# Altium footprint library PcbLib1.PcbLib: 41 footprints (part 1 of 3)
Each footprint in its own frame and in the unit in brackets; x right, y up, seen from the top. Pads: shape width x height; smd on the part's side, far side on the other; paste and mask are expansions set on the pad; w line width, h text height; cw(c..) or ccw(c..) is an arc to the next point about the centre after c.
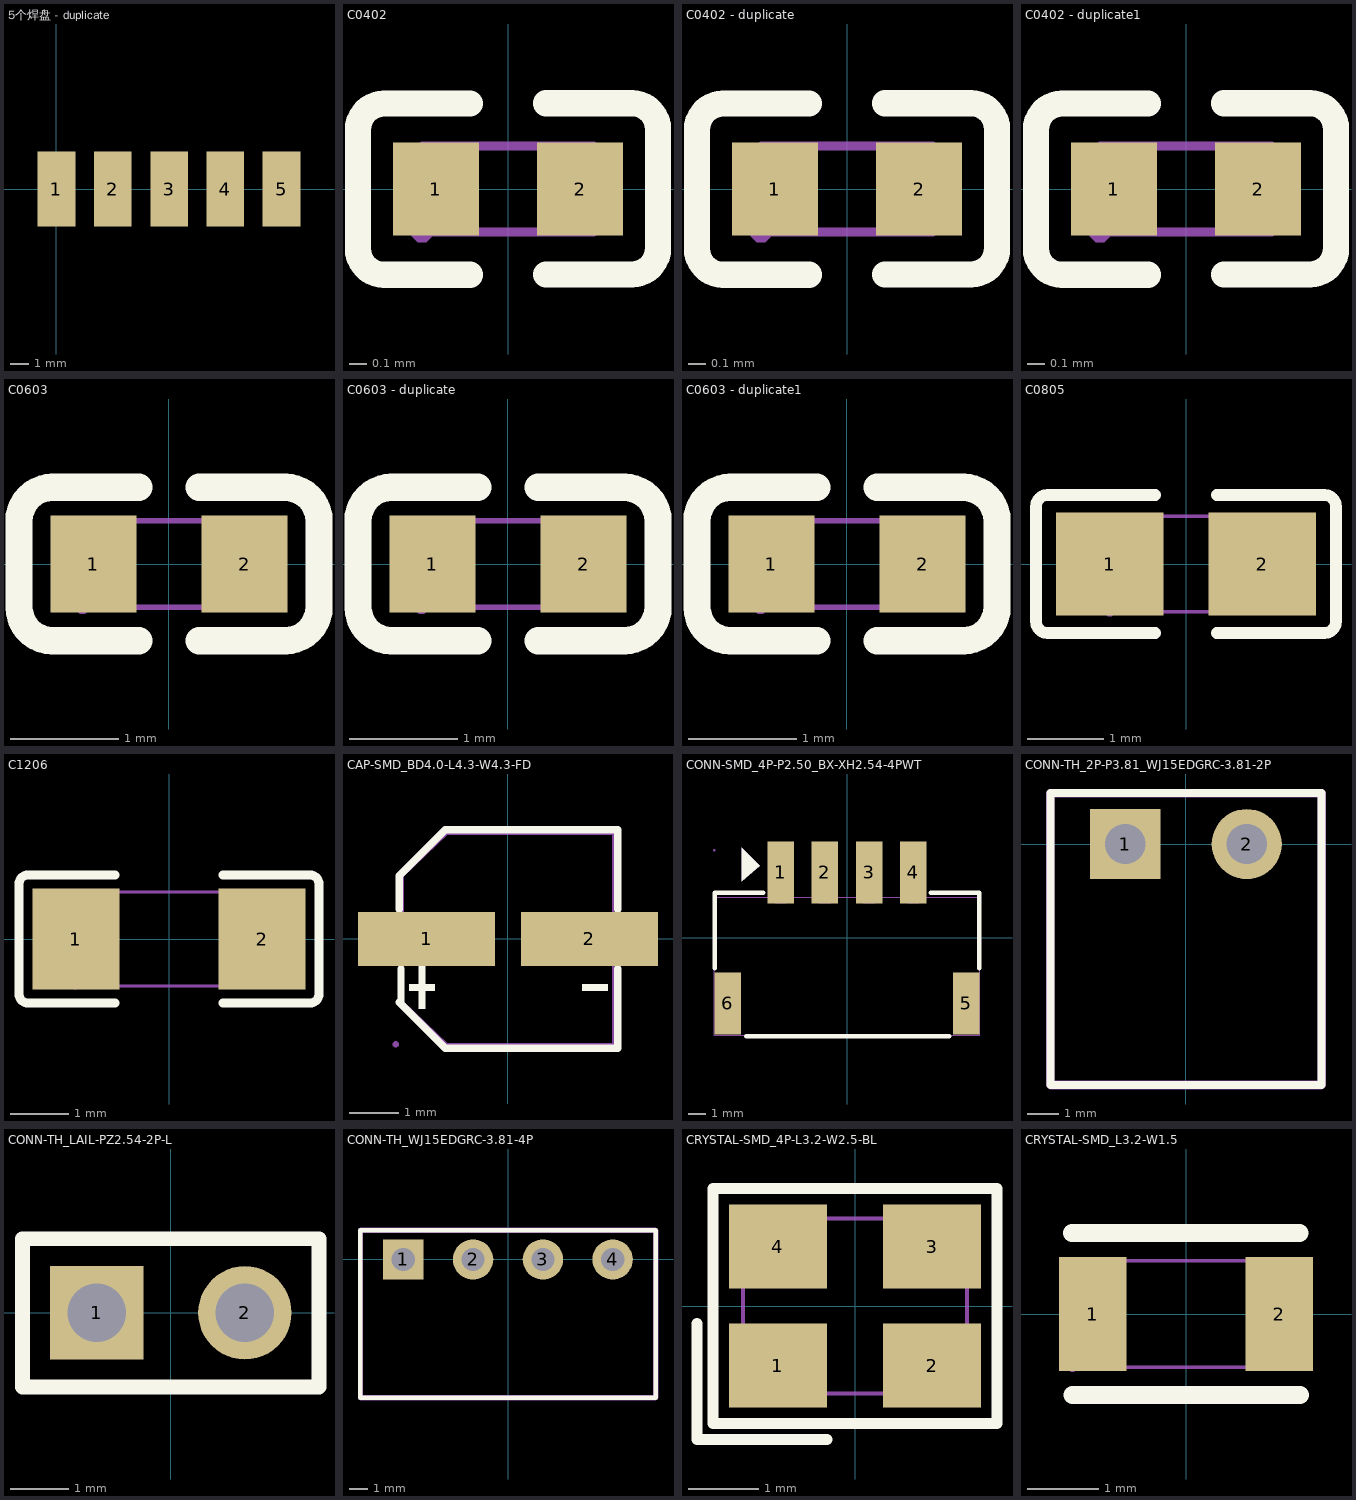
[diagram p0: the footprints below, top view; thin cyan lines are the x and y axes]

## 5个焊盘 - duplicate [mm]
pads (5):
  rect 2x4 smd: 1(0,0) 2(3,0) 3(6.001,0) 4(9,0) 5(12,0)

## C0402 [mm]
pads (2):
  rect 0.5x0.54 smd: 1(-0.42,0) 2(0.42,0)
Top Overlay:
  lines w0.152: -0.221,-0.5 -0.721,-0.5 cw(c-0.721,-0.347) -0.874,-0.347 -0.874,0.345 cw(c-0.721,0.345) -0.721,0.498 -0.221,0.498 ; 0.221,-0.498 0.721,-0.498 ccw(c0.721,-0.345) 0.874,-0.345 0.874,0.347 ccw(c0.721,0.347) 0.721,0.5 0.221,0.5
Mechanical 6:
  lines w0.051: -0.5,-0.25 0.5,-0.25 0.5,0.25 -0.5,0.25 -0.5,-0.25
Mechanical 8:
  region: -0.44,-0.25 -0.44,-0.275 -0.475,-0.31 -0.525,-0.31 -0.56,-0.275 -0.56,-0.25 -0.56,-0.225 -0.525,-0.19 -0.475,-0.19 -0.44,-0.225 -0.44,-0.25
Mechanical 9:
  region: 0.5,-0.25 0.5,0.25 0.25,0.25 0.25,-0.25
  region: -0.5,-0.25 -0.5,0.25 -0.25,0.25 -0.25,-0.25

## C0402 - duplicate [mm]
pads (2):
  rect 0.5x0.54 smd: 1(-0.42,0) 2(0.42,0)
Top Overlay:
  lines w0.152: -0.221,-0.5 -0.721,-0.5 cw(c-0.721,-0.347) -0.874,-0.347 -0.874,0.345 cw(c-0.721,0.345) -0.721,0.498 -0.221,0.498 ; 0.221,-0.498 0.721,-0.498 ccw(c0.721,-0.345) 0.874,-0.345 0.874,0.347 ccw(c0.721,0.347) 0.721,0.5 0.221,0.5
Mechanical 6:
  lines w0.051: -0.5,-0.25 0.5,-0.25 0.5,0.25 -0.5,0.25 -0.5,-0.25
Mechanical 8:
  region: -0.44,-0.25 -0.44,-0.275 -0.475,-0.31 -0.525,-0.31 -0.56,-0.275 -0.56,-0.25 -0.56,-0.225 -0.525,-0.19 -0.475,-0.19 -0.44,-0.225 -0.44,-0.25
Mechanical 9:
  region: 0.5,-0.25 0.5,0.25 0.25,0.25 0.25,-0.25
  region: -0.5,-0.25 -0.5,0.25 -0.25,0.25 -0.25,-0.25

## C0402 - duplicate1 [mm]
pads (2):
  rect 0.5x0.54 smd: 1(-0.42,0) 2(0.42,0)
Top Overlay:
  lines w0.152: -0.221,-0.5 -0.721,-0.5 cw(c-0.721,-0.347) -0.874,-0.347 -0.874,0.345 cw(c-0.721,0.345) -0.721,0.498 -0.221,0.498 ; 0.221,-0.498 0.721,-0.498 ccw(c0.721,-0.345) 0.874,-0.345 0.874,0.347 ccw(c0.721,0.347) 0.721,0.5 0.221,0.5
Mechanical 6:
  lines w0.051: -0.5,-0.25 0.5,-0.25 0.5,0.25 -0.5,0.25 -0.5,-0.25
Mechanical 8:
  region: -0.44,-0.25 -0.44,-0.275 -0.475,-0.31 -0.525,-0.31 -0.56,-0.275 -0.56,-0.25 -0.56,-0.225 -0.525,-0.19 -0.475,-0.19 -0.44,-0.225 -0.44,-0.25
Mechanical 9:
  region: 0.5,-0.25 0.5,0.25 0.25,0.25 0.25,-0.25
  region: -0.5,-0.25 -0.5,0.25 -0.25,0.25 -0.25,-0.25

## C0603 [mm]
pads (2):
  rect 0.8x0.9 smd: 1(-0.7,0) 2(0.7,0)
Top Overlay:
  lines w0.254: -1.08,-0.71 -0.28,-0.71 ; -1.08,0.71 -0.28,0.71 ; -1.08,-0.71 cw(c-1.08,-0.4) -1.39,-0.4 -1.39,0.4 cw(c-1.08,0.4) -1.08,0.71 ; 0.28,-0.71 1.08,-0.71 ccw(c1.08,-0.4) 1.39,-0.4 1.39,0.4 ccw(c1.08,0.4) 1.08,0.71 0.28,0.71
Mechanical 6:
  lines w0.051: -0.8,-0.4 -0.8,0.4 0.8,0.4 0.8,-0.4 -0.8,-0.4
Mechanical 8:
  region: -0.74,-0.4 -0.74,-0.425 -0.775,-0.46 -0.825,-0.46 -0.86,-0.425 -0.86,-0.4 -0.86,-0.375 -0.825,-0.34 -0.775,-0.34 -0.74,-0.375 -0.74,-0.4
Mechanical 9:
  region: -0.8,-0.4 -0.8,0.4 -0.5,0.4 -0.5,-0.4
  region: 0.8,-0.4 0.8,0.4 0.5,0.4 0.5,-0.4

## C0603 - duplicate [mm]
pads (2):
  rect 0.8x0.9 smd: 1(-0.7,0) 2(0.7,0)
Top Overlay:
  lines w0.254: -1.08,-0.71 -0.28,-0.71 ; -1.08,0.71 -0.28,0.71 ; -1.08,-0.71 cw(c-1.08,-0.4) -1.39,-0.4 -1.39,0.4 cw(c-1.08,0.4) -1.08,0.71 ; 0.28,-0.71 1.08,-0.71 ccw(c1.08,-0.4) 1.39,-0.4 1.39,0.4 ccw(c1.08,0.4) 1.08,0.71 0.28,0.71
Mechanical 6:
  lines w0.051: -0.8,-0.4 0.8,-0.4 0.8,0.4 -0.8,0.4 -0.8,-0.4
Mechanical 8:
  region: -0.74,-0.4 -0.74,-0.425 -0.775,-0.46 -0.825,-0.46 -0.86,-0.425 -0.86,-0.4 -0.86,-0.375 -0.825,-0.34 -0.775,-0.34 -0.74,-0.375 -0.74,-0.4
Mechanical 9:
  region: 0.8,-0.4 0.8,0.4 0.5,0.4 0.5,-0.4
  region: -0.8,-0.4 -0.8,0.4 -0.5,0.4 -0.5,-0.4

## C0603 - duplicate1 [mm]
pads (2):
  rect 0.8x0.9 smd: 1(-0.7,0) 2(0.7,0)
Top Overlay:
  lines w0.254: -1.08,-0.71 -0.28,-0.71 ; -1.08,0.71 -0.28,0.71 ; -1.08,-0.71 cw(c-1.08,-0.4) -1.39,-0.4 -1.39,0.4 cw(c-1.08,0.4) -1.08,0.71 ; 0.28,-0.71 1.08,-0.71 ccw(c1.08,-0.4) 1.39,-0.4 1.39,0.4 ccw(c1.08,0.4) 1.08,0.71 0.28,0.71
Mechanical 6:
  lines w0.051: -0.8,-0.4 -0.8,0.4 0.8,0.4 0.8,-0.4 -0.8,-0.4
Mechanical 8:
  region: -0.74,-0.4 -0.74,-0.425 -0.775,-0.46 -0.825,-0.46 -0.86,-0.425 -0.86,-0.4 -0.86,-0.375 -0.825,-0.34 -0.775,-0.34 -0.74,-0.375 -0.74,-0.4
Mechanical 9:
  region: -0.8,-0.4 -0.8,0.4 -0.5,0.4 -0.5,-0.4
  region: 0.8,-0.4 0.8,0.4 0.5,0.4 0.5,-0.4

## C0805 [mm]
pads (2):
  rect 1.41x1.35 smd paste-100 mask+0.051: 1(-1,0) 2(1,0)
Top Overlay:
  lines w0.152: -0.401,-0.904 -1.811,-0.904 cw(c-1.811,-0.751) -1.964,-0.751 -1.964,0.751 cw(c-1.811,0.751) -1.811,0.904 -0.401,0.904 ; 0.401,-0.904 1.811,-0.904 ccw(c1.811,-0.751) 1.964,-0.751 1.964,0.751 ccw(c1.811,0.751) 1.811,0.904 0.401,0.904
Top Paste:
  region: -1.705,-0.64 -1.705,0.64 -1.655,0.69 -0.505,0.69 -0.455,0.64 -0.45,0.23 -0.9,0.23 -0.9,-0.22 -0.46,-0.22 -0.455,-0.64 -0.505,-0.69 -1.655,-0.69
  region: 1.705,0.64 1.705,-0.64 1.655,-0.69 0.505,-0.69 0.455,-0.64 0.45,-0.23 0.9,-0.23 0.9,0.22 0.46,0.22 0.455,0.64 0.505,0.69 1.655,0.69
Mechanical 6:
  lines w0.051: -1,-0.625 -1,0.625 1,0.625 1,-0.625 -1,-0.625
Mechanical 8:
  region: -0.94,-0.625 -0.94,-0.65 -0.975,-0.685 -1.025,-0.685 -1.06,-0.65 -1.06,-0.625 -1.06,-0.6 -1.025,-0.565 -0.975,-0.565 -0.94,-0.6 -0.94,-0.625
Mechanical 9:
  region: -1,-0.625 -1,0.625 -0.5,0.625 -0.5,-0.625
  region: 1,0.625 1,-0.625 0.5,-0.625 0.5,0.625

## C1206 [mm]
pads (2):
  rect 1.485x1.728 smd paste-100 mask+0.051: 1(-1.593,0) 2(1.593,0)
Top Overlay:
  lines w0.152: -0.926,-1.093 -2.411,-1.093 cw(c-2.411,-0.94) -2.564,-0.94 -2.564,0.94 cw(c-2.411,0.94) -2.411,1.093 -0.926,1.093 ; 0.926,-1.093 2.411,-1.093 ccw(c2.411,-0.94) 2.564,-0.94 2.564,0.94 ccw(c2.411,0.94) 2.411,1.093 0.926,1.093
Top Paste:
  region: -0.85,-0.764 -0.85,-0.394 -0.95,-0.294 -1.255,-0.294 -1.355,-0.194 -1.355,0.194 -1.255,0.294 -0.95,0.294 -0.85,0.394 -0.85,0.764 -0.95,0.864 -2.235,0.864 -2.335,0.764 -2.335,-0.764 -2.235,-0.864 -0.95,-0.864
  region: 0.85,-0.764 0.85,-0.394 0.95,-0.294 1.255,-0.294 1.355,-0.194 1.355,0.194 1.255,0.294 0.95,0.294 0.85,0.394 0.85,0.764 0.95,0.864 2.235,0.864 2.335,0.764 2.335,-0.764 2.235,-0.864 0.95,-0.864
Mechanical 6:
  lines w0.051: -1.6,-0.8 1.6,-0.8 1.6,0.8 -1.6,0.8 -1.6,-0.8
Mechanical 8:
  region: -1.54,-0.8 -1.54,-0.825 -1.575,-0.86 -1.625,-0.86 -1.66,-0.825 -1.66,-0.8 -1.66,-0.775 -1.625,-0.74 -1.575,-0.74 -1.54,-0.775 -1.54,-0.8
Mechanical 9:
  region: 1.6,-0.8 1.6,0.8 1.1,0.8 1.1,-0.8
  region: -1.6,-0.8 -1.6,0.8 -1.1,0.8 -1.1,-0.8

## CAP-SMD_BD4.0-L4.3-W4.3-FD [mm]
pads (2):
  rect 2.8x1.1 smd: 1(-1.661,0) 2(1.661,0)
Top Overlay:
  region: -1.818,-0.559 -1.818,-1.419 -1.689,-1.419 -1.689,-0.559
  region: -2.011,-0.925 -2.011,-1.054 -1.495,-1.054 -1.495,-0.925
  region: 2.031,-0.925 2.031,-1.054 1.515,-1.054 1.515,-0.925
  lines w0.152: -2.217,-1.29 -1.28,-2.226 2.236,-2.226 2.236,-0.607 ; -2.217,0.607 -2.217,1.29 -1.28,2.226 2.236,2.226 2.236,0.607 ; -2.183,-1.29 -2.183,-0.607
Mechanical 2:
  region: -1.818,0.43 -1.818,-0.43 -1.689,-0.43 -1.689,0.43
  region: -2.011,0.064 -2.011,-0.065 -1.495,-0.065 -1.495,0.064
  region: 2.031,0.064 2.031,-0.065 1.515,-0.065 1.515,0.064
Mechanical 6:
  lines w0.051: -2.15,-1.281 -2.15,1.281 -1.248,2.15 2.15,2.15 2.15,-2.15 -1.248,-2.15 -2.15,-1.281
Mechanical 8:
  region: -2.23,-2.15 -2.23,-2.175 -2.266,-2.21 -2.315,-2.21 -2.35,-2.175 -2.35,-2.15 -2.35,-2.125 -2.315,-2.09 -2.266,-2.09 -2.23,-2.125 -2.23,-2.15
Mechanical 9:
  region: -2.29,0.325 -2.29,-0.325 -0.49,-0.325 -0.49,0.325
  region: 2.31,0.325 2.31,-0.325 0.51,-0.325 0.51,0.325

## CONN-SMD_4P-P2.50_BX-XH2.54-4PWT [mm]
pads (6):
  rect 1.5x3.5 smd paste+0 mask+0.05: 1(-3.75,3.7) 2(-1.25,3.7) 3(1.25,3.7) 4(3.75,3.7) 5(6.73,-3.7) 6(-6.73,-3.7)
Top Overlay:
  region: -4.946,4.081 -5.962,5.097 -5.962,3.192
  lines w0.254: -7.486,-1.719 -7.486,2.557 -4.731,2.557 ; -5.708,-5.571 5.783,-5.571 ; 4.73,2.558 6.389,2.558 7.486,2.558 7.486,-1.719
Mechanical 2:
  region: -4.946,4.081 -5.962,5.097 -5.962,3.192
Mechanical 6:
  lines w0.051: -7.5,-5.502 7.5,-5.502 7.5,2.298 -7.5,2.298 -7.5,-5.502
Mechanical 8:
  region: -7.44,4.95 -7.44,4.925 -7.475,4.89 -7.525,4.89 -7.56,4.925 -7.56,4.95 -7.56,4.975 -7.525,5.01 -7.475,5.01 -7.44,4.975 -7.44,4.95
Mechanical 9:
  region: 6.53,-2.45 6.93,-2.45 6.93,-4.95 6.53,-4.95
  region: -6.93,-2.45 -6.53,-2.45 -6.53,-4.95 -6.93,-4.95
  region: 3.43,4.95 4.07,4.95 4.07,1.95 3.43,1.95
  region: 0.93,4.95 1.57,4.95 1.57,1.95 0.93,1.95
  region: -1.57,4.95 -0.93,4.95 -0.93,1.95 -1.57,1.95
  region: -4.07,4.95 -3.43,4.95 -3.43,1.95 -4.07,1.95

## CONN-TH_2P-P3.81_WJ15EDGRC-3.81-2P [mm]
pads (2):
  rect 2.2x2.2 hole 1.26: 1(-1.905,0)
  round 2.2 hole 1.26: 2(1.905,0)
Top Overlay:
  lines w0.254: -4.25,-7.55 -4.25,1.6 4.25,1.6 4.25,-7.55 -4.25,-7.55
Mechanical 2:
  region: -4.123,1.6 -4.123,-7.423 4.123,-7.423 4.123,1.6 4.133,1.649 4.16,1.69 4.201,1.717 4.25,1.727 4.299,1.717 4.34,1.69 4.367,1.649 4.377,1.6 4.377,-7.55 4.367,-7.599 4.34,-7.64 4.299,-7.667 4.25,-7.677 -4.25,-7.677 -4.299,-7.667 -4.34,-7.64 -4.367,-7.599 -4.377,-7.55 -4.377,1.6 -4.367,1.649 -4.34,1.69 -4.299,1.717 -4.25,1.727 -4.201,1.717 -4.16,1.69 -4.133,1.649
  region: 4.25,1.473 -4.25,1.473 -4.299,1.483 -4.34,1.51 -4.367,1.551 -4.377,1.6 -4.367,1.649 -4.34,1.69 -4.299,1.717 -4.25,1.727 4.25,1.727 4.299,1.717 4.34,1.69 4.367,1.649 4.377,1.6 4.367,1.551 4.34,1.51 4.299,1.483
Mechanical 6:
  lines w0.051: -4.25,-7.55 -4.25,1.6 4.25,1.6 4.25,-7.55 -4.25,-7.55
Mechanical 8:
  region: -4.19,-7.55 -4.19,-7.575 -4.225,-7.61 -4.275,-7.61 -4.31,-7.575 -4.31,-7.55 -4.31,-7.525 -4.275,-7.49 -4.225,-7.49 -4.19,-7.525 -4.19,-7.55
Mechanical 9:
  region: 1.505,0.4 2.305,0.4 2.305,-0.4 1.505,-0.4
  region: -2.305,0.4 -1.505,0.4 -1.505,-0.4 -2.305,-0.4

## CONN-TH_LAIL-PZ2.54-2P-L [mm]
pads (2):
  rect 1.6x1.6 hole 1 paste-2539.97 mask+0.05: 1(-1.27,0)
  round 1.6 hole 1 paste-2539.97 mask+0.05: 2(1.27,0)
Top Overlay:
  lines w0.254: -2.54,-1.27 -2.54,1.27 2.54,1.27 2.54,-1.27 -2.54,-1.27
Mechanical 6:
  lines w0.051: -2.54,-1.25 -2.54,1.25 2.54,1.25 2.54,-1.25 -2.54,-1.25
Mechanical 8:
  region: -2.48,-1.25 -2.48,-1.275 -2.515,-1.31 -2.565,-1.31 -2.6,-1.275 -2.6,-1.25 -2.6,-1.225 -2.565,-1.19 -2.515,-1.19 -2.48,-1.225 -2.48,-1.25
Mechanical 9:
  region: -1.59,0.32 -0.95,0.32 -0.95,-0.32 -1.59,-0.32
  region: 0.95,0.32 1.59,0.32 1.59,-0.32 0.95,-0.32

## CONN-TH_WJ15EDGRC-3.81-4P [mm]
pads (4):
  rect 2.2x2.2 hole 1.26: 1(-5.715,0)
  round 2.2 hole 1.26: 2(-1.905,0) 3(1.905,0) 4(5.715,0)
Top Overlay:
  lines w0.254: -8.06,-7.55 -8.06,1.6 8.06,1.6 8.06,-7.55 -8.06,-7.55
Mechanical 2:
  region: -7.933,1.6 -7.933,-7.423 7.933,-7.423 7.933,1.6 7.943,1.649 7.97,1.69 8.011,1.717 8.06,1.727 8.109,1.717 8.15,1.69 8.177,1.649 8.187,1.6 8.187,-7.55 8.177,-7.599 8.15,-7.64 8.109,-7.667 8.06,-7.677 -8.06,-7.677 -8.109,-7.667 -8.15,-7.64 -8.177,-7.599 -8.187,-7.55 -8.187,1.6 -8.177,1.649 -8.15,1.69 -8.109,1.717 -8.06,1.727 -8.011,1.717 -7.97,1.69 -7.943,1.649
  region: 8.06,1.473 -8.06,1.473 -8.109,1.483 -8.15,1.51 -8.177,1.551 -8.187,1.6 -8.177,1.649 -8.15,1.69 -8.109,1.717 -8.06,1.727 8.06,1.727 8.109,1.717 8.15,1.69 8.177,1.649 8.187,1.6 8.177,1.551 8.15,1.51 8.109,1.483
Mechanical 6:
  lines w0.051: -8.06,-7.55 -8.06,1.6 8.06,1.6 8.06,-7.55 -8.06,-7.55
Mechanical 8:
  region: -8,-7.55 -8,-7.575 -8.035,-7.61 -8.085,-7.61 -8.12,-7.575 -8.12,-7.55 -8.12,-7.525 -8.085,-7.49 -8.035,-7.49 -8,-7.525 -8,-7.55
Mechanical 9:
  region: -6.115,0.4 -5.315,0.4 -5.315,-0.4 -6.115,-0.4
  region: -2.305,0.4 -1.505,0.4 -1.505,-0.4 -2.305,-0.4
  region: 1.505,0.4 2.305,0.4 2.305,-0.4 1.505,-0.4
  region: 5.315,0.4 6.115,0.4 6.115,-0.4 5.315,-0.4

## CRYSTAL-SMD_4P-L3.2-W2.5-BL [mm]
pads (4):
  rect 1.4x1.2 smd: 1(-1.1,-0.85) 2(1.1,-0.85) 3(1.1,0.85) 4(-1.1,0.85)
Top Overlay:
  lines w0.152: -2.257,-0.25 -2.257,-1.907 -0.4,-1.907 ; -2.029,-1.678 -2.029,1.679 2.029,1.679 2.029,-1.678 -2.029,-1.678
Mechanical 2:
  circle w0.254: c-1.27,-0.889 r0.127
Mechanical 6:
  lines w0.051: -1.6,-1.25 -1.6,1.25 1.6,1.25 1.6,-1.25 -1.6,-1.25
Mechanical 8:
  region: -1.54,-1.25 -1.54,-1.275 -1.575,-1.31 -1.625,-1.31 -1.66,-1.275 -1.66,-1.25 -1.66,-1.225 -1.625,-1.19 -1.575,-1.19 -1.54,-1.225 -1.54,-1.25
Mechanical 9:
  region: -1.5,1.15 -0.6,1.15 -0.6,0.35 -1.5,0.35
  region: 0.6,1.15 1.5,1.15 1.5,0.35 0.6,0.35
  region: 0.6,-0.35 1.5,-0.35 1.5,-1.15 0.6,-1.15
  region: -1.5,-0.35 -0.6,-0.35 -0.6,-1.15 -1.5,-1.15

## CRYSTAL-SMD_L3.2-W1.5 [mm]
pads (2):
  rect 0.95x1.6 smd: 1(-1.308,0) 2(1.308,0)
Top Overlay:
  lines w0.254: -1.603,1.14 1.597,1.14 ; -1.597,-1.14 1.603,-1.14
Mechanical 6:
  lines w0.051: -1.597,-0.75 1.603,-0.75 1.603,0.75 -1.597,0.75 -1.597,-0.75
Mechanical 8:
  region: -1.537,-0.75 -1.537,-0.775 -1.573,-0.81 -1.622,-0.81 -1.657,-0.775 -1.657,-0.75 -1.657,-0.725 -1.622,-0.69 -1.573,-0.69 -1.537,-0.725 -1.537,-0.75
Mechanical 9:
  region: -1.598,-0.65 -1.598,0.65 -0.847,0.65 -0.847,-0.65
  region: 0.853,-0.65 0.853,0.65 1.603,0.65 1.603,-0.65